# Altium schematic symbol library Schlib1.SchLib: 5 symbols
Pins are listed as number, name and electrical type; pins without a type are passive.

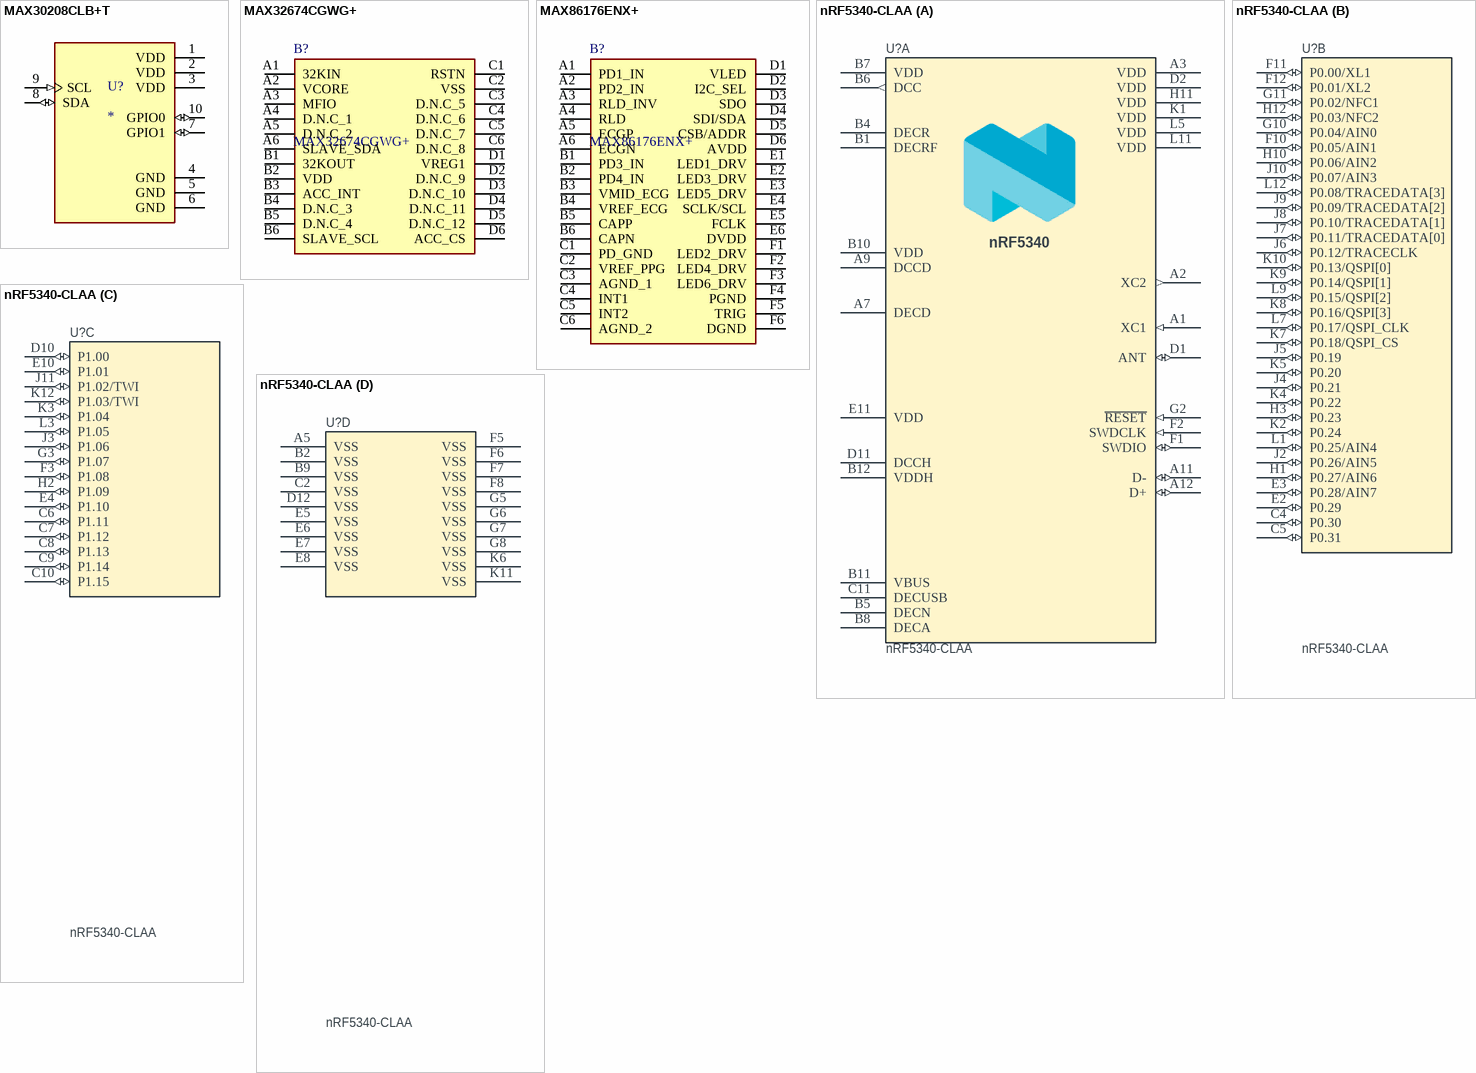
[diagram p0: symbols MAX30208CLB+T to nRF5340-CLAA]

## MAX30208CLB+T
designator U?
Temperature Sensor Digital, Local 0Â°C ~ 70Â°C 16 b 10-LGA (2x2); MP: MAX30208CLB+T; MF: Maxim Integrated; SnapEDA_Link: https://www.snapeda.com/parts/MAX30208CLB+T/Maxim+Integrated/view-part/?ref=snap; Availability: In Stock; Package: WFLGA-10 Maxim Integrated; Purchase-URL: https://pricing.snapeda.com/search/part/MAX30208CLB+T/?ref=eda; Check_prices: https://www.snapeda.com/parts/MAX30208CLB+T/Maxim+Integrated/view-part/?ref=eda; Value: *; Price: None
footprint IC_MAX30208CLB+T
pins: 1 VDD (power), 2 VDD (power), 3 VDD (power), 4 GND (power), 5 GND (power), 6 GND (power), 7 GPIO1 (io), 8 SDA (io), 9 SCL (in), 10 GPIO0 (io)

## MAX32674CGWG+
designator B?
SENSOR/ALGORITHM HUB; Manufacturer_Name: Analog Devices; Geometry.Height: 0.69mm; Manufacturer_Part_Number: MAX32674CGWG+; Mouser Part Number: 700-MAX32674CGWG+; Mouser Price/Stock: https://www.mouser.co.uk/ProductDetail/Analog-Devices-Maxim-Integrated/MAX32674CGWG%2b?qs=vvQtp7zwQdPHB82d12mH4A%3D%3D; Arrow Part Number: *; Arrow Price/Stock: *; Datasheet Link: http://www.maximintegrated.com/MAX32674C
footprint BGA24C40P6X4_175X250X69
pins: A1 32KIN, A2 VCORE, A3 MFIO, A4 D.N.C_1, A5 D.N.C_2, A6 SLAVE_SDA, B1 32KOUT, B2 VDD, B3 ACC_INT, B4 D.N.C_3, B5 D.N.C_4, B6 SLAVE_SCL, C1 RSTN, C2 VSS, C3 D.N.C_5, C4 D.N.C_6, C5 D.N.C_7, C6 D.N.C_8, D1 VREG1, D2 D.N.C_9, D3 D.N.C_10, D4 D.N.C_11, D5 D.N.C_12, D6 ACC_CS

## MAX86176ENX+
designator B?
Ultra-Low Power, Optical PPG and Single Lead ECG AFE, 36 WLP; Manufacturer_Name: Analog Devices; Geometry.Height: 0.5mm; Manufacturer_Part_Number: MAX86176ENX+; Mouser Part Number: 700-MAX86176ENX+; Mouser Price/Stock: https://www.mouser.co.uk/ProductDetail/Analog-Devices-Maxim-Integrated/MAX86176ENX%2b?qs=ti9wR6LxNKVxSXrBstNX5w%3D%3D; Arrow Part Number: *; Arrow Price/Stock: *; Datasheet Link: https://g.componentsearchengine.com/Datasheets/0/13224961.pdf
footprint BGA36C40P6X6_271X273X50
pins: A1 PD1_IN, A2 PD2_IN, A3 RLD_INV, A4 RLD, A5 ECGP, A6 ECGN, B1 PD3_IN, B2 PD4_IN, B3 VMID_ECG, B4 VREF_ECG, B5 CAPP, B6 CAPN, C1 PD_GND, C2 VREF_PPG, C3 AGND_1, C4 INT1, C5 INT2, C6 AGND_2, D1 VLED, D2 I2C_SEL, D3 SDO, D4 SDI/SDA, D5 CSB/ADDR, D6 AVDD, E1 LED1_DRV, E2 LED3_DRV, E3 LED5_DRV, E4 SCLK/SCL, E5 FCLK, E6 DVDD, F1 LED2_DRV, F2 LED4_DRV, F3 LED6_DRV, F4 PGND, F5 TRIG, F6 DGND

## nRF5340-CLAA
designator U?
Multi-protocol Bluetooth Low Energy, IEEE 802.15.4, ANT and 2.4GHz proprietary system-on-chip; Pad Count: 95; Footprint Doc: WLCSP-95; Value: nRF5340-CLAA; Component Class: nRF_Devices; Author: rsk
footprint BGA95C35P12X11_437X397X50
part A pins: A1 XC1 (in), A2 XC2 (out), A3 VDD (power), A7 DECD (power), A9 DCCD (power), A11 D- (io), A12 D+ (io), B1 DECRF (power), B4 DECR (power), B5 DECN (power), B6 DCC (out), B7 VDD (power), B8 DECA (power), B10 VDD (power), B11 VBUS (power), B12 VDDH (power), C11 DECUSB (power), D1 ANT (io), D2 VDD (power), D11 DCCH (power), E11 VDD (power), F1 SWDIO (io), F2 SWDCLK (in), G2 ~{RESET} (in), H11 VDD (power), K1 VDD (power), L5 VDD (power), L11 VDD (power)
part B pins: C4 P0.30 (io), C5 P0.31 (io), E2 P0.29 (io), E3 P0.28/AIN7 (io), F10 P0.05/AIN1 (io), F11 P0.00/XL1 (io), F12 P0.01/XL2 (io), G10 P0.04/AIN0 (io), G11 P0.02/NFC1 (io), H1 P0.27/AIN6 (io), H3 P0.23 (io), H10 P0.06/AIN2 (io), H12 P0.03/NFC2 (io), J2 P0.26/AIN5 (io), J4 P0.21 (io), J5 P0.19 (io), J6 P0.12/TRACECLK (io), J7 P0.11/TRACEDATA[0] (io), J8 P0.10/TRACEDATA[1] (io), J9 P0.09/TRACEDATA[2] (io), J10 P0.07/AIN3 (io), K2 P0.24 (io), K4 P0.22 (io), K5 P0.20 (io), K7 P0.18/QSPI_CS (io), K8 P0.16/QSPI[3] (io), K9 P0.14/QSPI[1] (io), K10 P0.13/QSPI[0] (io), L1 P0.25/AIN4 (io), L7 P0.17/QSPI_CLK (io), L9 P0.15/QSPI[2] (io), L12 P0.08/TRACEDATA[3] (io)
part C pins: C6 P1.11 (io), C7 P1.12 (io), C8 P1.13 (io), C9 P1.14 (io), C10 P1.15 (io), D10 P1.00 (io), E4 P1.10 (io), E10 P1.01 (io), F3 P1.08 (io), G3 P1.07 (io), H2 P1.09 (io), J3 P1.06 (io), J11 P1.02/TWI (io), K3 P1.04 (io), K12 P1.03/TWI (io), L3 P1.05 (io)
part D pins: A5 VSS (power), B2 VSS (power), B9 VSS (power), C2 VSS (power), D12 VSS (power), E5 VSS (power), E6 VSS (power), E7 VSS (power), E8 VSS (power), F5 VSS (power), F6 VSS (power), F7 VSS (power), F8 VSS (power), G5 VSS (power), G6 VSS (power), G7 VSS (power), G8 VSS (power), K6 VSS (power), K11 VSS (power)
part A text: nRF5340

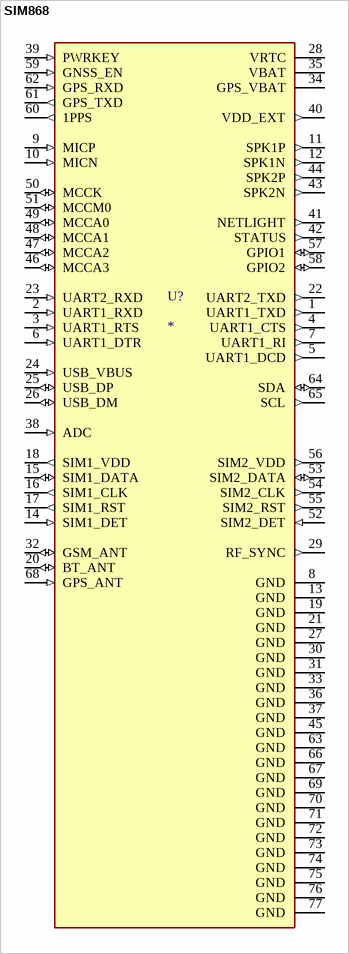
[diagram p1: symbol SIM868]

## SIM868
designator U?
SIM868 GNSS, GSM RF mikroBUSâ„¢ Clickâ„¢ Platform Evaluation Expansion Board; MF: MikroElektronika; Check_prices: https://www.snapeda.com/parts/SIM868/MikroElektronika/view-part/?ref=eda; Value: *; Availability: Not in stock; MP: SIM868; Price: None; Package: None; SnapEDA_Link: https://www.snapeda.com/parts/SIM868/MikroElektronika/view-part/?ref=snap
footprint XCVR_SIM868
pins: 1 UART1_TXD (out), 2 UART1_RXD (in), 3 UART1_RTS (in), 4 UART1_CTS (out), 5 UART1_DCD (out), 6 UART1_DTR (in), 7 UART1_RI (out), 8 GND (power), 9 MICP (in), 10 MICN (in), 11 SPK1P (out), 12 SPK1N (out), 13 GND (power), 14 SIM1_DET (in), 15 SIM1_DATA (io), 16 SIM1_CLK (out), 17 SIM1_RST (out), 18 SIM1_VDD (out), 19 GND (power), 20 BT_ANT (io), 21 GND (power), 22 UART2_TXD (out), 23 UART2_RXD (in), 24 USB_VBUS (in), 25 USB_DP (io), 26 USB_DM (io), 27 GND (power), 28 VRTC (power), 29 RF_SYNC (out), 30 GND (power), 31 GND (power), 32 GSM_ANT (io), 33 GND (power), 34 GPS_VBAT (power), 35 VBAT (power), 36 GND (power), 37 GND (power), 38 ADC (in), 39 PWRKEY (in), 40 VDD_EXT (out), 41 NETLIGHT (out), 42 STATUS (out), 43 SPK2N (out), 44 SPK2P (out), 45 GND (power), 46 MCCA3 (io), 47 MCCA2 (io), 48 MCCA1 (io), 49 MCCA0 (io), 50 MCCK (io), 51 MCCM0 (io), 52 SIM2_DET (in), 53 SIM2_DATA (io), 54 SIM2_CLK (out), 55 SIM2_RST (out), 56 SIM2_VDD (out), 57 GPIO1 (io), 58 GPIO2 (io), 59 GNSS_EN (in), 60 1PPS (out), 61 GPS_TXD (out), 62 GPS_RXD (in), 63 GND (power), 64 SDA (io), 65 SCL (out), 66 GND (power), 67 GND (power), 68 GPS_ANT (in), 69 GND (power), 70 GND (power), 71 GND (power), 72 GND (power), 73 GND (power), 74 GND (power), 75 GND (power), 76 GND (power), 77 GND (power)